# Altium footprint library Capacitors_PTH.PcbLib: 14 footprints
Each footprint in its own frame and in the unit in brackets; x right, y up, seen from the top. Pads: shape width x height; smd on the part's side, far side on the other; paste and mask are expansions set on the pad; w line width, h text height; cw(c..) or ccw(c..) is an arc to the next point about the centre after c.
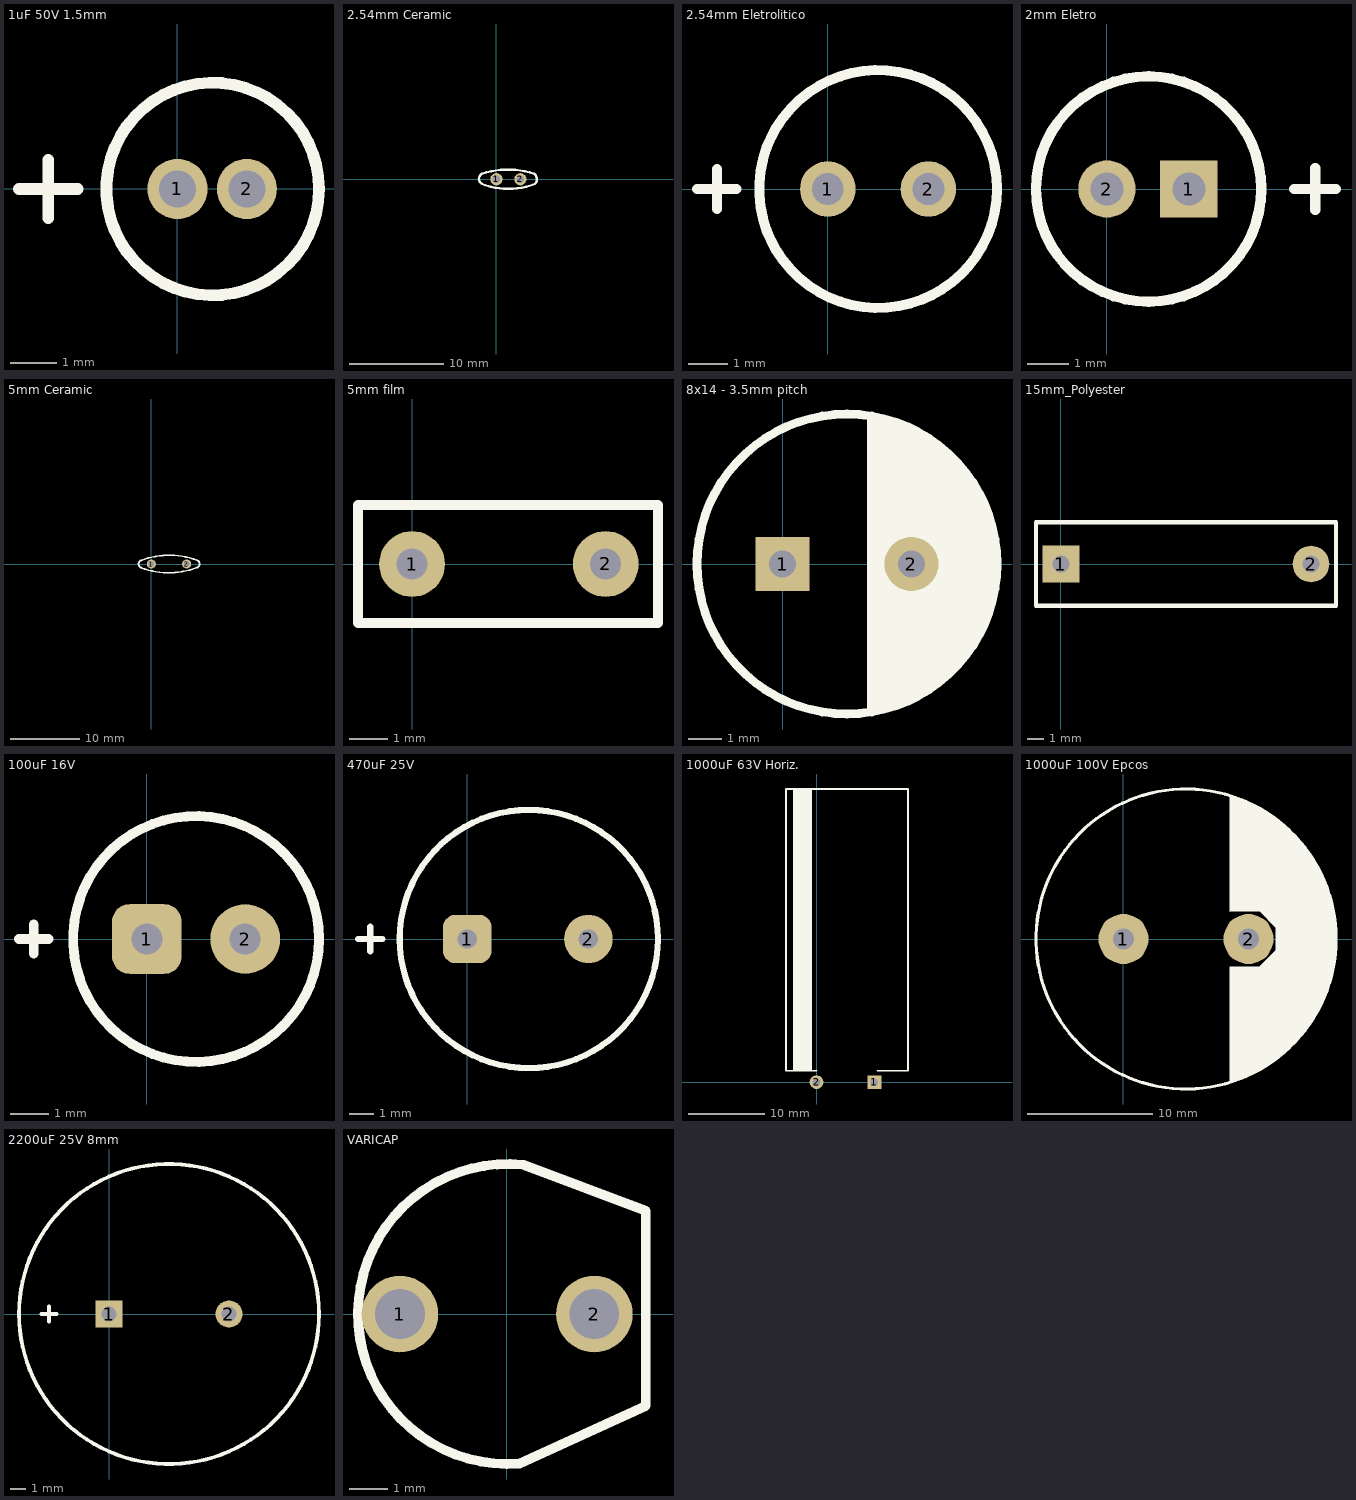
[diagram p0: the footprints below, top view; thin cyan lines are the x and y axes]

## 1uF 50V 1.5mm [mm]
pads (2):
  round 1.3 hole 0.8: 1(0,0) 2(1.5,0)
Top Overlay:
  circle w0.254: c0.762,0 r2.3
  lines w0.254: -3.429,0 -2.159,0 ; -2.794,-0.635 -2.794,0.635

## 2.54mm Ceramic [mm] "2.54mm PITCH DISC CERAMIC CAPACITOR"
pads (2):
  round 1.3 hole 0.8: 1(0,0) 2(2.54,0)
Top Overlay:
  lines w0.254: -1.567,0.57 ccw(c-1.226,0.044) -1.524,-0.508 ccw(c1.27,6.921) 4.064,-0.508 ccw(c3.574,0.012) 4.021,0.57 ccw(c1.227,-7.959) -1.567,0.57
3D body "User Library-C025-020X045.STEP": height 4.7, standoff -2.87, extent -0.928,-1.03 3.468,1.049

## 2.54mm Eletrolitico [mm] "5x12 - 2.54mm pitch"
pads (2):
  round 1.4 hole 0.8 unplated: 1(0,0) 2(2.54,0)
Top Overlay:
  circle w0.254: c1.27,0 r3
  lines w0.254: -3.3,0 -2.3,0 ; -2.8,-0.5 -2.8,0.5
3D body "User Library-CE_R100_D200_H460.step": height 13.48, standoff -1.62, extent -1.24,-2.538 3.84,2.538

## 2mm Eletro [mm] "Cap_Ele_5x11,5mm_2mm_Pitch"
pads (2):
  rect 1.4x1.4 hole 0.8: 1(2,0)
  round 1.4 hole 0.8: 2(0,0)
Top Overlay:
  circle w0.254: c1.016,0 r2.747
  lines w0.254: 4.572,0 5.588,0 ; 5.08,-0.508 5.08,0.508
3D body "User Library-cap 5x11PRETO.STEP": height 11.5, standoff -18.5, extent -1.484,-2.54 3.516,2.46

## 5mm Ceramic [mm] "5mm PITCH DISC CERAMIC CAPACITOR"
pads (2):
  round 1.3 hole 0.8: 1(0,0) 2(5.08,0)
Top Overlay:
  lines w0.254: -1.483,-0.554 ccw(c2.5,10.164) 6.604,-0.508 ccw(c6.383,0.015) 6.563,0.554 ccw(c2.58,-10.164) -1.524,0.508 ccw(c-1.27,0) -1.45,-0.539
3D body "User Library-Ceramic Disc Capacitor 0_2in pitch.step": height 7.5, standoff -1, extent -0.96,-0.874 6.039,0.823

## 5mm film [mm] "2,5x6,5x7,3 - 5mm PITCH"
pads (2):
  round 1.7 hole 0.8: 1(0,0) 2(5,0)
Top Overlay:
  lines w0.254: -1.397,-1.524 6.35,-1.524 6.35,1.524 -1.397,1.524 -1.397,-1.524
3D body "User Library-B32529C_2_5x6_5x7_3.step": height 7.5, standoff -2.5, extent -1.204,-1.27 6.096,1.23

## 8x14 - 3.5mm pitch [mm]
pads (2):
  rect 1.6x1.6 hole 0.8 unplated: 1(0,0)
  round 1.6 hole 0.8 unplated: 2(3.8,0)
Top Overlay:
  circle w0.254: c1.9,0 r4.427
  region: 2.5,-4.25 3.146,-4.25 3.231,-4.25 3.395,-4.217 3.551,-4.153 3.691,-4.059 3.75,-4 3.809,-4 3.926,-3.977 4.036,-3.931 4.135,-3.865 4.177,-3.823 4.5,-3.5 4.559,-3.5 4.676,-3.477 4.786,-3.431 4.885,-3.365 4.927,-3.323 5.323,-2.927 5.365,-2.885 5.431,-2.786 5.477,-2.676 5.5,-2.559 5.5,-2.5 5.823,-2.177 5.865,-2.135 5.931,-2.036 5.977,-1.926 6,-1.809 6,-1.75 6.059,-1.691 6.153,-1.551 6.217,-1.395 6.25,-1.231 6.25,-1.146 6.25,0.698 6.25,0.948 6.152,1.439 5.961,1.901 5.683,2.317 5.506,2.494 4.457,3.543 4.289,3.711 3.894,3.975 3.454,4.157 2.988,4.25 2.75,4.25 2.5,4.25
3D body "User Library-CE_R150_D320_H570.step": height 14.65, standoff -2.65, extent -2.2,-4.1 6,4.1

## 15mm_Polyester [mm]
pads (2):
  rect 2.2x2.2 hole 1 unplated: 1(0,0)
  round 2.2 hole 1 unplated: 2(15,0)
Top Overlay:
  lines w0.254: -1.5,-2.5 -1.5,2.5 16.5,2.5 16.5,-2.5 -1.5,-2.5
3D body "User Library-CPLP15mm.step": height 11, standoff -2.6, extent -1.5,-2.5 16.5,2.5

## 100uF 16V [mm] "6,3x12mm - 2.54mm"
pads (2):
  rrect50% 1.8x1.8 hole 0.8 unplated: 1(0,0)
  round 1.8 hole 0.8 unplated: 2(2.54,0)
Top Overlay:
  circle w0.254: c1.27,0 r3.175
  lines w0.254: -3.302,0 -2.54,0 ; -2.921,-0.381 -2.921,0.381
3D body "PRETO.STEP": height 12.67, standoff -0.83, extent -1.879,-3.149 4.419,3.15

## 470uF 25V [mm]
pads (2):
  rrect50% 2x2 hole 0.8: 1(0,0)
  round 2 hole 0.8: 2(5,0)
Top Overlay:
  circle w0.254: c2.54,0 r5.334
  lines w0.254: -4.516,0 -3.5,0 ; -4.008,-0.508 -4.008,0.508
3D body "CapAluRadial_D100H125.STEP": height 15, standoff -2, extent -2.761,-5.223 7.739,5.274

## 1000uF 63V Horiz. [mm]
pads (2):
  rect 1.8x1.8 hole 1 unplated: 1(7.6,0)
  round 1.8 hole 1 unplated: 2(0,0)
Top Overlay:
  rectangle: -3.1,1.5 -0.6,38.5
  lines w0.254: 0,1.5 -4,1.5 -4,38.5 12,38.5 12,1.5 8,1.5
3D body "Capacitor Electrolitic Radial 16x32.STEP": height 17, standoff -4, extent -4.2,-0.4 11.797,38

## 1000uF 100V Epcos [mm] "8mm Pitch"
pads (2):
  round 4 hole 1.7 unplated: 1(0,0) 2(10,0)
Top Overlay:
  circle w0.254: c5,0 r12
  region: 8.5,11.456 10.9,10.4 13,9 14.3,7.6 15.7,5.5 16.6,2.9 17,1.1 17,-0.7 16.6,-3.3 15.7,-5.5 14,-7.9 12.2,-9.6 10.2,-10.8 8.5,-11.516 8.5,-2.2 10.9,-2.2 12.2,-0.9 12.2,0.9 10.9,2.2 8.5,2.2
3D body "2222.STEP": height 36.3, standoff -0.2, extent -5.996,-11 15.996,11

## 2200uF 25V 8mm [mm]
pads (2):
  rect 1.8x1.8 hole 1 unplated: 1(0,0)
  round 1.8 hole 1 unplated: 2(8,0)
Top Overlay:
  circle w0.254: c4,0 r10
  lines w0.254: -4.5,0 -3.5,0 ; -4,-0.5 -4,0.5

## VARICAP [mm] "MURATA"
pads (2):
  round 2 hole 1.3: 1(-2.794,0) 2(2.286,0)
Top Overlay:
  lines w0.254: 0.338,-3.907 cw(c0.03,0.002) 0.43,3.902 3.63,2.702 3.63,-2.398 0.338,-3.907
3D body "Murata TZ03(VARICAP).step": height 5.8, standoff -2.3, extent -3.254,-3.046 2.746,2.954